# Altium footprint library shotky_diode_1N5882_footprint.PcbLib: 1 footprints
Each footprint in its own frame and in the unit in brackets; x right, y up, seen from the top. Pads: shape width x height; smd on the part's side, far side on the other; paste and mask are expansions set on the pad; w line width, h text height; cw(c..) or ccw(c..) is an arc to the next point about the centre after c.
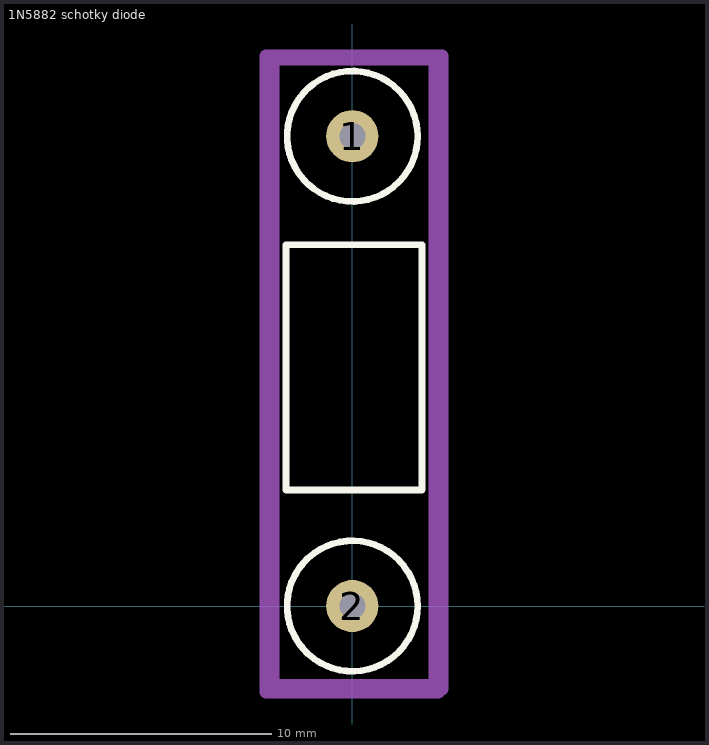
[diagram p0: the footprint, top view; thin cyan lines are the x and y axes]

## 1N5882 schotky diode [mm]
pads (2):
  round 2 hole 1: 1(0,18) 2(0,0)
Top Overlay:
  circle w0.254: c0,18 r2.5
  circle w0.254: c0,0 r2.5
  lines w0.254: -2.54,4.445 2.667,4.445 2.667,13.843 -2.54,13.843 -2.54,4.445
Mechanical 1:
  lines w0.5: -3.302,-3.302 3.302,-3.302 3.302,-3.175 3.429,-3.175 3.429,20.066 3.429,21.082 -3.302,21.082 -3.302,-3.302
Top Courtyard:
  lines w0.5: -3.048,-3.048 3.175,-3.048 3.175,20.955 -3.048,20.955 -3.048,-3.048